# Altium integrated library CJ125 SOIC24.IntLib: 1 symbol
Pins are listed as number, name and electrical type; pins without a type are passive.

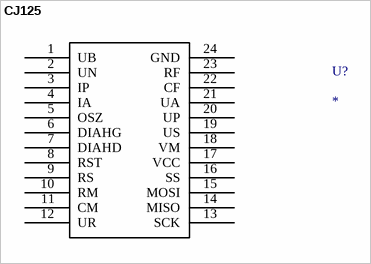
[diagram p0: symbol CJ125]

## CJ125
designator U?
footprint CJ125
pins: 1 UB, 2 UN, 3 IP, 4 IA, 5 OSZ, 6 DIAHG, 7 DIAHD, 8 RST, 9 RS, 10 RM, 11 CM, 12 UR, 13 SCK, 14 MISO, 15 MOSI, 16 SS, 17 VCC, 18 VM, 19 US, 20 UP, 21 UA, 22 CF, 23 RF, 24 GND